# EAGLE library part C36A (library k1)
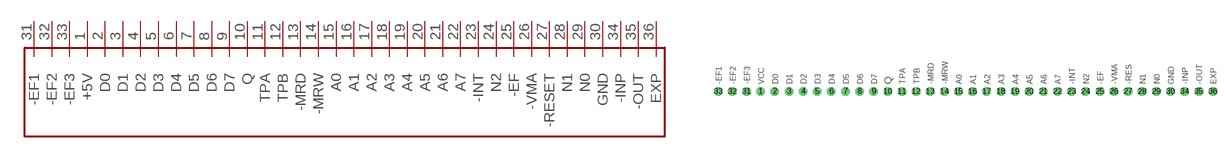
[diagram p5: symbol with the pads of C36A; footprint C36A]

Designator prefix -

## C36A  [C36A]
1  +5V  pwr
2  D0
3  D1
4  D2
5  D3
6  D4
7  D5
8  D6
9  D7
10  Q
11  TPA
12  TPB
13  -MRD
14  -MRW
15  A0
16  A1
17  A2
18  A3
19  A4
20  A5
21  A6
22  A7
23  -INT
24  N2
25  -EF
26  -VMA
27  -RESET
28  N1
29  N0
30  GND  sup
31  -EF1
32  -EF2
33  -EF3
34  -INP
35  -OUT
36  EXP

## Footprint C36A (pad centres in mm)
drill 1.016 octagon: 1 -44.45,0; 2 -41.91,0; 3 -39.37,0; 4 -36.83,0; 5 -34.29,0; 6 -31.75,0; 7 -29.21,0; 8 -26.67,0; 9 -24.13,0; 10 -21.59,0; 11 -19.05,0; 12 -16.51,0; 13 -13.97,0; 14 -11.43,0; 15 -8.89,0; 16 -6.35,0; 17 -3.81,0; 18 -1.27,0; 19 1.27,0; 20 3.81,0; 21 6.35,0; 22 8.89,0; 23 11.43,0; 24 13.97,0; 25 16.51,0; 26 19.05,0; 27 21.59,0; 28 24.13,0; 29 26.67,0; 30 29.21,0; 31 -46.99,0; 32 -49.53,0; 33 -52.07,0; 34 31.75,0; 35 34.29,0; 36 36.83,0